# EAGLE library part TRANSISTOR_BJT_BC847BS (library dp_devices.v6)
Dual 45V 100mA NPN transistor
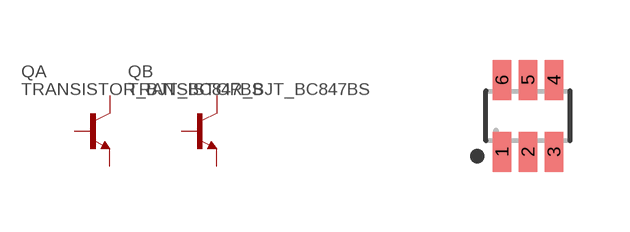
[diagram p215: symbol with the pads of SC-70-6; footprint SC-70-6]

Designator prefix Q; gates A=NPN B=NPN

## TRANSISTOR_BJT_BC847BS  [SC-70-6]
1  A:E  pas
2  A:B  pas
3  B:C  pas
4  B:E  pas
5  B:B  pas
6  A:C  pas

## Footprint SC-70-6 (pad centres in mm)
smd 0.47 x 1: 1 -0.65,-0.9; 2 0,-0.9; 3 0.65,-0.9; 4 0.65,0.9; 5 0,0.9; 6 -0.65,0.9